# Altium integrated library LD39050PU33R.IntLib: 1 symbol
Pins are listed as number, name and electrical type; pins without a type are passive.

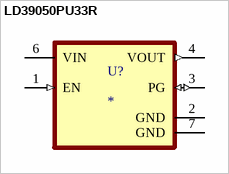
[diagram p0: symbol LD39050PU33R]

## LD39050PU33R
designator U?
Linear Voltage Regulator IC Positive Fixed 1 Output 500mA 6-DFN (3x3); MF: STMicroelectronics; MP: LD39050PU33R; SnapEDA_Link: https://www.snapeda.com/parts/LD39050PU33R/STMicroelectronics/view-part/?ref=snap; Package: DFN-6 STMicroelectronics; Value: *; Check_prices: https://www.snapeda.com/parts/LD39050PU33R/STMicroelectronics/view-part/?ref=eda
footprint SON95P300X300X100-7N
pins: 1 EN (in), 2 GND (power), 3 PG (io), 4 VOUT (out), 6 VIN (power), 7 GND (power)